# Altium schematic symbol library Centralize.SchLib: 1081 symbols (part 9 of 26)
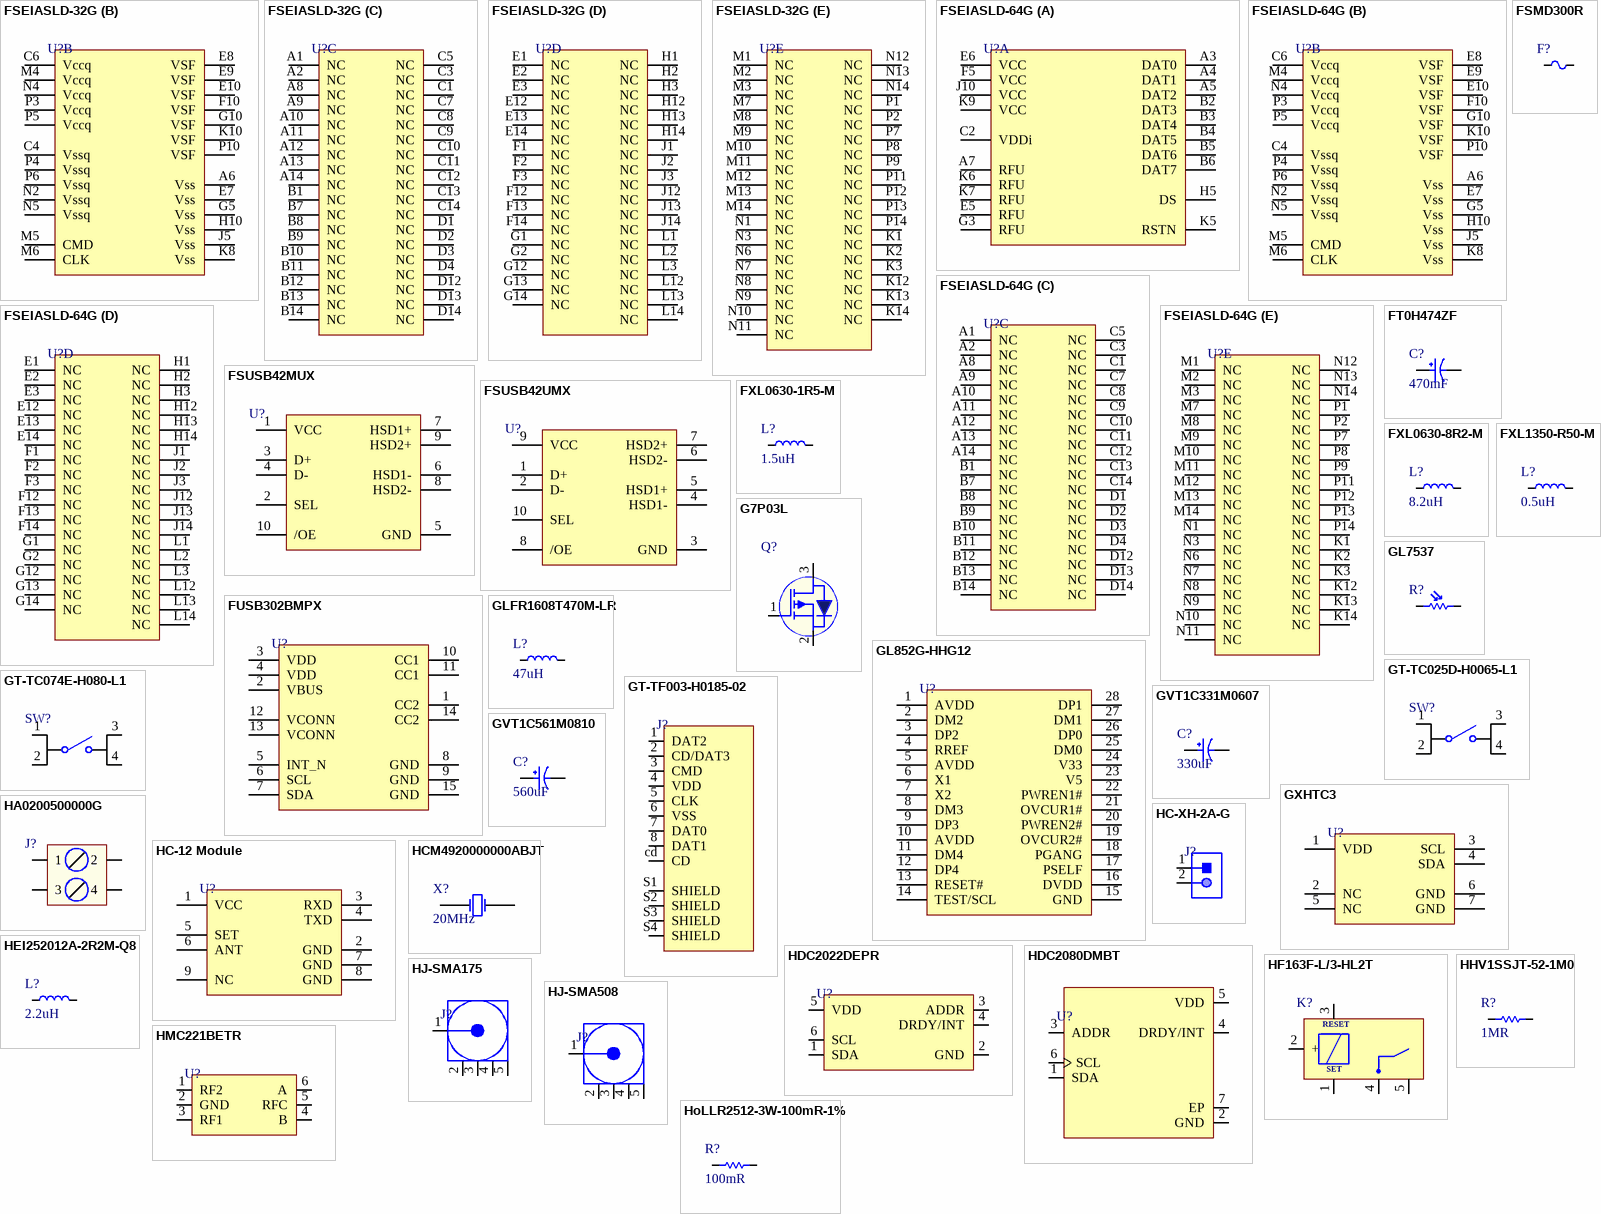
[diagram p55: symbols FSEIASLD-32G to HoLLR2512-3W-100mR-1%]

## HEI252012A-2R2M-Q8
designator L?, comment 2.2uH
2.5A 2.2uH ±20% 74mΩ SMD Power Inductors ROHS; Manufacturer: Chilisin Elec; Manufacturer Part Number: HEI252012A-2R2M-Q8; ComponentLink1Description: LCSC; ComponentLink1URL: https://lcsc.com/product-detail/Power-Inductors_Chilisin-Elec-HEI252012A-2R2M-Q8_C412888.html; Footprint: Custom
footprint HEI252012A-2R2M-Q8_ (IND SMD 2.2uH 2.5A)
pins: 1, 2

## HF163F-L/3-HL2T
designator K?
AgSnO2 3V 5 Normal Open:1A(SPST-Normal Open) Plugin,10x24mm Magnetic Latching Relays ROHS; Manufacturer: HF(Xiamen Hongfa Electroacoustic); Manufacturer Part Number: HF163F-L/3-HL2T; Item Type: Relay; Package: Plugin,10x24mm; LCSC Part Number: C140724; ComponentLink1Description: LCSC; ComponentLink1URL: https://www.lcsc.com/product-detail/Magnetic-Latching-Relays_HF-Xiamen-Hongfa-Electroacoustic-HF163F-L-3-HL2T_C140724.html
footprint HF163F-L/3-HL2T
pins: 1 SET, 2 +, 3 RESET, 4 COM, 5 NO

## HHV1SSJT-52-1M0
designator R?, comment 1MR
Metal Film Resistors 1MΩ 1W ±200ppm/℃ ±5% Plugin Through Hole Resistors ROHS; Manufacturer: YAGEO; Manufacturer Part Number: HHV1SSJT-52-1M0; Package: Plugin; LCSC Part Number: C432907; Item Type: Through Hole Resistor; ComponentLink1Description: LCSC; ComponentLink1URL: https://www.lcsc.com/product-detail/Through-Hole-Resistors_YAGEO-HHV1SSJT-52-1M0_C432907.html
footprint HHV1SSJT-52-1M0
pins: 1, 2

## HJ-SMA175
designator J?
1 Inner bore SMA Board Edge Bend 11mm 5.35mm Plugin RF Connectors / Coaxial Connectors ROHS; Manufacturer: HJ Tech; Manufacturer Part Number: HJ-SMA175; Item Type: SMA Connector; Package: Plugin; LCSC Part Number: C1509213; ComponentLink1Description: LCSC; ComponentLink1URL: https://www.lcsc.com/product-detail/RF-Connectors-Coaxial-Connectors_HJ-Tech-HJ-SMA175_C1509213.html
footprint HJ-SMA175
pins: 1 Signal "Signal Pin", 2 GND, 3 GND, 4 GND, 5 GND

## HJ-SMA508
designator J?
1 Inner bore SMA Board Edge Bend -55℃~+155℃ 50Ω Plugin RF Connectors / Coaxial Connectors ROHS; Manufacturer: HJ Tech; Manufacturer Part Number: HJ-SMA508; Footprint: Custom; ComponentLink1Description: LCSC; ComponentLink1URL: https://lcsc.com/product-detail/RF-Connectors-Coaxial-Connectors_HJ-Tech-HJ-SMA508_C1509209.html; LCSC Part Number: C1509209; Item Type: SMA
footprint HJ-SMA508_
pins: 1 Signal "Signal Pin", 2 GND, 3 GND, 4 GND, 5 GND

## HMC221BETR
designator U?
IC RF SWITCH SPDT 3GHZ SOT23-6; Manufacturer: Analog Devices; Manufacturer Part Number: HMC221BETR; Insertion Loss: 0.8dB; P1dB: 29dBm; IIP3: 54dBm; Impedance: 50R; Operating Frequency: DC to 3 GHz; Max Power Dissipation: 360mW; Number of Switches: 1; Operating Supply Voltage: 8V; Supplier 1: Digi-Key; RoHS: No; Category: RF Semiconductors and Devices; Stock 1: 2378; Pricing 1: 1=3.54, 10=3.183, 25=3.0092, 100=2.6081, 250=2.47436 (USD); Case/Package: SOT-23-6; Min Operating Temperature: -40°C; Max Operating Temperature: 85°C; Throw Configuration: SPDT; Series: -; Packaging: Tape and Reel; Test Frequency: 3GHz; Package Quantity: 500; Technology: GAAS; Clock Frequency: 3GHz; ComponentLink1URL: https://datasheet.ciiva.com/29636/hmc221b-29636048.pdf?src-supplier=Digi-Key; ComponentLink1Description: https://datasheet.ciiva.com/29636/hmc221b-29636048.pdf?src-supplier=Digi-Key; ComponentLink2URL: https://datasheet.ciiva.com/29636/qtr-2013-00285-29636046.pdf?src-supplier=Digi-Key; ComponentLink2Description: https://datasheet.ciiva.com/29636/qtr-2013-00285-29636046.pdf?src-supplier=Digi-Key; ComponentLink3URL: https://datasheet.ciiva.com/29636/qtr-2013-00285-29636047.pdf?src-supplier=Digi-Key; ComponentLink3Description: https://datasheet.ciiva.com/29636/qtr-2013-00285-29636047.pdf?src-supplier=Digi-Key; Supplier Part Number 1: 505-HMC221BETRCT-ND; Item Type: IC
footprint SOT-23-6
pins: 1 RF2 "0", 2 GND "0", 3 RF1 "0", 4 B "0", 5 RFC "0", 6 A "0"

## HoLLR2512-3W-100mR-1%
designator R?, comment 100mR
3W 100mΩ Surface Mount ±50ppm/℃ ±1% 2512 Current Sense Resistors/Shunt Resistors ROHS; Manufacturer: Milliohm; Manufacturer Part Number: HoLLR2512-3W-100mR-1%; Package: 2512; LCSC Part Number: C2994646; ComponentLink1Description: LCSC; ComponentLink1URL: https://www.lcsc.com/product-detail/Current-Sense-Resistors-Shunt-Resistors_Milliohm-HoLLR2512-3W-100mR-1_C2994646.html; Item Type: Resistor
footprint RES-2512
pins: 1, 2

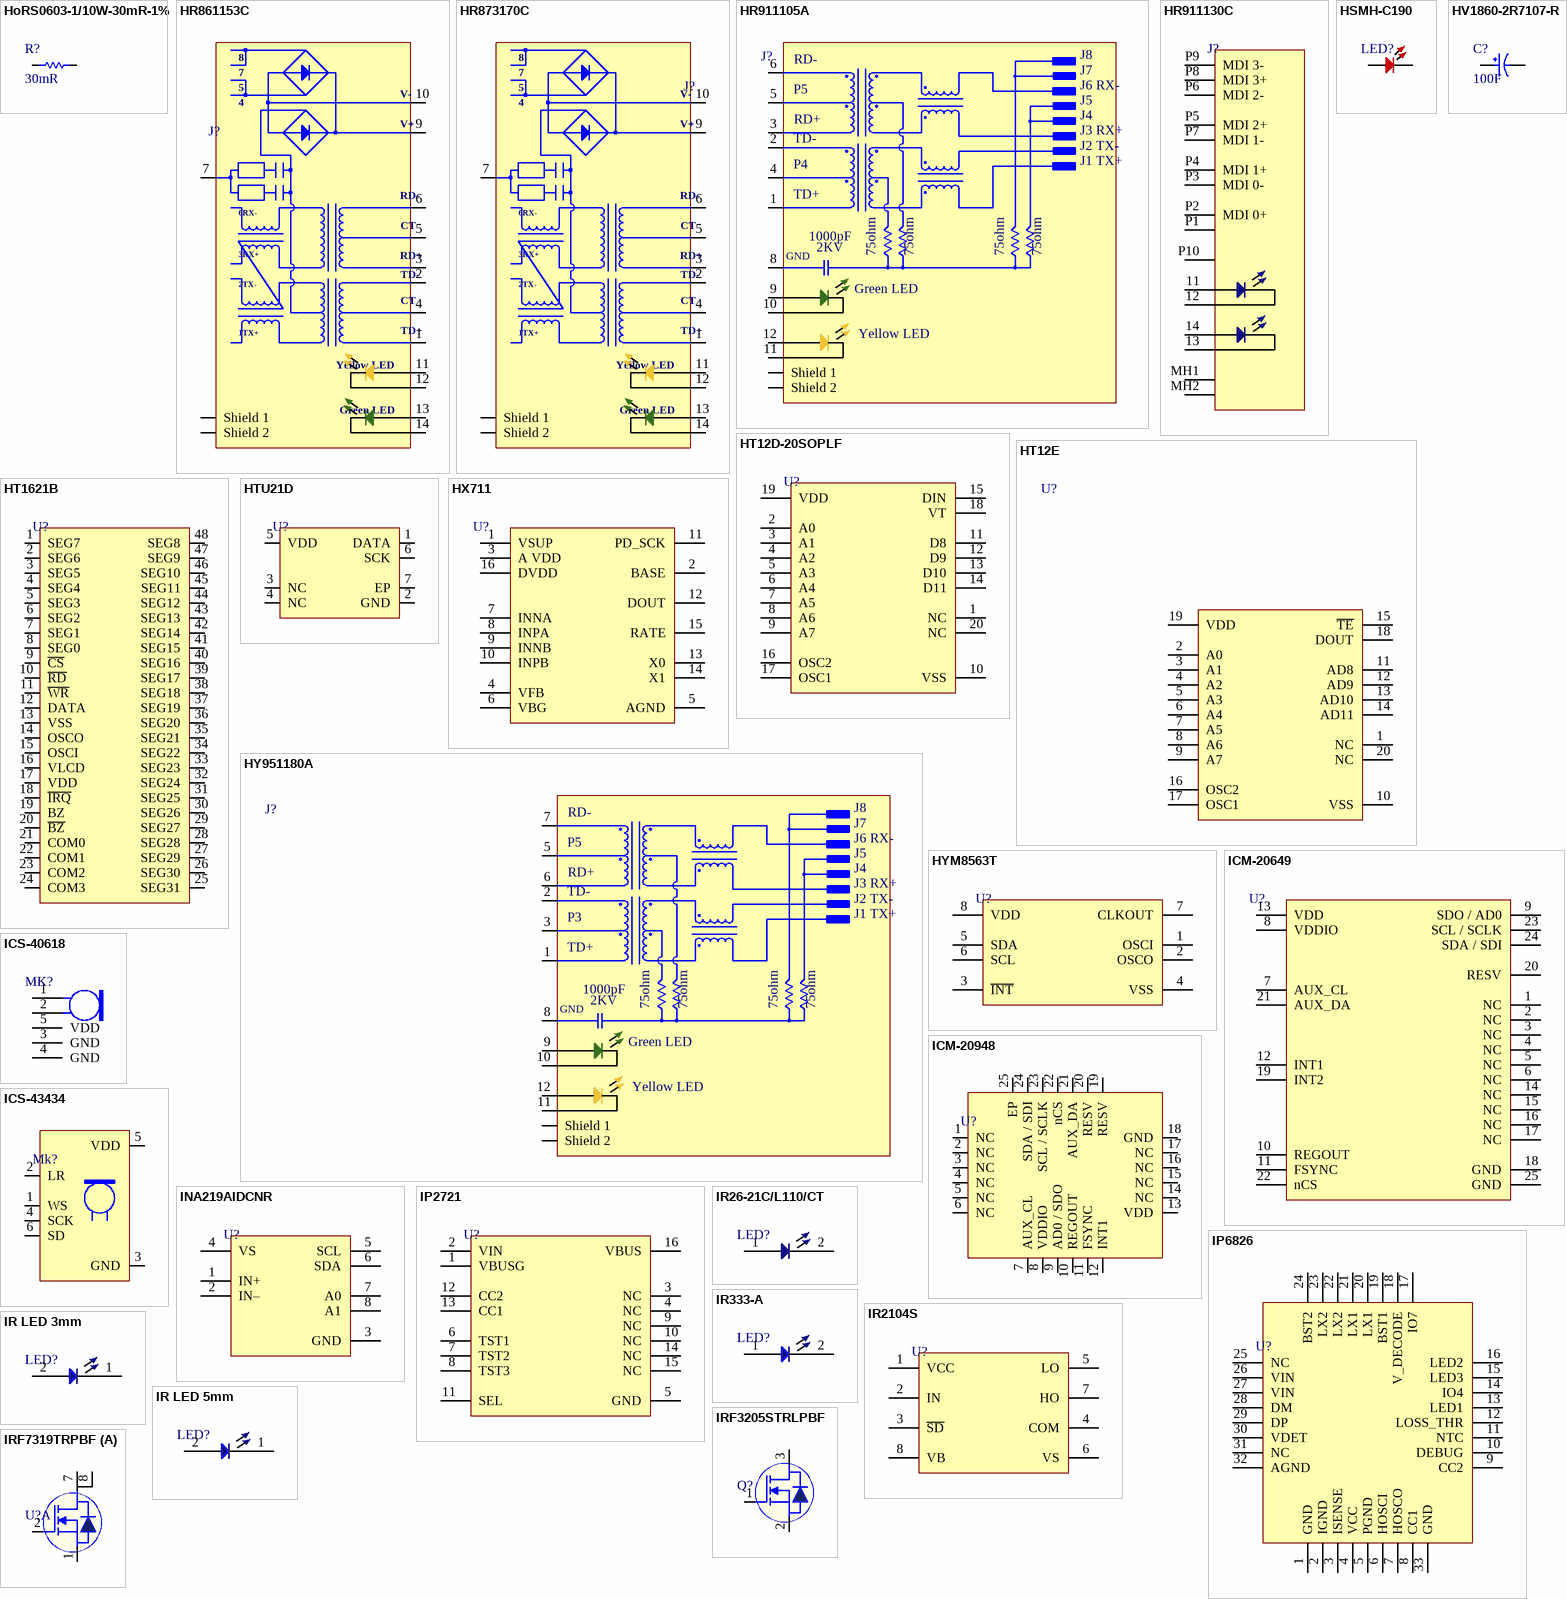
[diagram p10: symbols HoRS0603-1/10W-30mR-1% to IRF7319TRPBF]

## HoRS0603-1/10W-30mR-1%
designator R?, comment 30mR
100mW Ceramic resistor ±1% ±1200ppm/℃ 30mΩ 0603 Chip Resistor - Surface Mount ROHS; Manufacturer: Milliohm; Manufacturer Part Number: HoRS0603-1/10W-30mR-1%; Package: 0603; LCSC Part Number: C2912726; Item Type: Resistor; ComponentLink1Description: LCSC; ComponentLink1URL: https://www.lcsc.com/product-detail/Chip-Resistor-Surface-Mount_Milliohm-HoRS0603-1-10W-30mR-1_C2912726.html
footprint Res-0603
pins: 1, 2

## HR861153C
designator J?
Single Port RJ45 Connector with Integrated Magnetics and LED for 10/100Base-TX PoE application; Manufacturer: Hanrun; Manufacturer Part Number: HR861153C; Item Type: Ethernet Connector; Package: Custom; LCSC Part Number: *
footprint HR861153C
pins: 1 TD+, 2 TD-, 3 RD+, 4 CT, 5 CT, 6 RD-, 7 GND, 9 V+, 10 V-, 11 ANODE , 12 CATHODE, 13 ANODE , 14 CATHODE, Shield 1, Shield 2
text: 8; 6RX-; 3RX+; 2TX-; 1TX+; Yellow LED; Green LED

## HR873170C
designator J?
1x1 Port Tab-UP RJ45 Connector with Integrated Magnetics and LED for 10/100Base-T PoE application; Manufacturer: Hanrun; Manufacturer Part Number: HR873170C; Item Type: Ethernet Connector; Package: Custom; LCSC Part Number: *
footprint HR873170C
pins: 1 TD+, 2 TD-, 3 RD+, 4 CT, 5 CT, 6 RD-, 7 GND, 9 V+, 10 V-, 11 ANODE , 12 CATHODE, 13 ANODE , 14 CATHODE, Shield 1, Shield 2
text: 8; 6RX-; 3RX+; 2TX-; 1TX+; Yellow LED; Green LED

## HR911105A
designator J?
RJ45 RJReceptacle 1 WithLED Plugin Ethernet Connectors/Modular Connectors (RJ45 RJ11) ROHS; Manufacturer: HANRUN; Manufacturer Part Number: HR911105A; Item Type: RJ45 Connector; Package: Plugin; LCSC Part Number: C12074; ComponentLink1Description: LCSC; ComponentLink1URL: https://www.lcsc.com/product-detail/Ethernet-Connectors-Modular-Connectors-RJ45-RJ11_HANRUN-Zhongshan-HanRun-Elec-HR911105A_C12074.html
footprint HR911105A
pins: 1 TD+, 2 TD-, 3 RD+, 4 P4, 5 P5, 6 RD-, 8 GND (power), 9 ANODE , 10 CATHODE, 11 CATHODE, 12 ANODE , Shield 1, Shield 2
text: J8; J7; J6 RX-; J5; J4; J3 RX+; J2 TX-; J1 TX+; 1000pF; 2KV; 75ohm; Green LED; Yellow LED

## HR911130C
designator J?
RJ45 RJReceptacle 1 Internal oscillator included Shrouded WithLED Plugin Ethernet Connectors/Modular Connectors (RJ45 RJ11) ROHS; Manufacturer: HANRUN; Manufacturer Part Number: HR911130C; LCSC Part Number: C50933; Item Type: Ethernet Connector; ComponentLink1Description: LCSC; ComponentLink1URL: https://www.lcsc.com/product-detail/Ethernet-Connectors-Modular-Connectors-RJ45-RJ11_HANRUN-Zhongshan-HanRun-Elec-HR911130C_C50933.html
footprint HR911130C
pins: 11, 12, 13, 14, MH1, MH2, P1, P2 MDI 0+, P3 MDI 0-, P4 MDI 1+, P5 MDI 2+, P6 MDI 2-, P7 MDI 1-, P8 MDI 3+, P9 MDI 3-, P10

## HSMH-C190
designator LED?
LED RED DIFFUSED CHIP SMD; Manufacturer: Broadcom Avago; Manufacturer Part Number: HSMH-C190; Lens Color: White; Lens Style: Diffused,Colorless,Rectangular; Forward Voltage: 1.8V; Luminous Intensity: 17mcd; Wavelength: 639nm; Viewing Angle: 170°; Forward Current: 20mA; Power Dissipation: 52mW; Number of LEDs: 1; Reverse Voltage: 5V; Power Rating: 78mW; Supplier 1: Rs; RoHS: Yes; Category: LEDs; Stock 1: 1955; Pricing 1: 10=0.03600 (GBP); Mounting Technology: Surface Mount; Case/Package: 0603; Pins: 2; Color: Red; Case Code (Metric): 1608; Case Code (Imperial): 0603; Min Operating Temperature: -40°C; Max Operating Temperature: 85°C; Packaging: Tape and Reel; Dominant Wavelength: 639nm; Test Current: 20mA; Lens Transparency: Diffused; Max Power Dissipation: 52mW; Package Quantity: 1; Illumination Color: Red; Number of Elements: 1; Series: -; Length: 1.6mm; Width: 0.8mm; Height: 0.8mm; Depth: 0.8mm; Radiation Hardening: No; Reach SVHC Compliant: Yes; RoHS Compliant: Yes; Supplier Part Number 1: 7166570P; Item Type: LED
footprint LED-0603
pins: 1, 2

## HT12D-20SOPLF
designator U?
Remote Control Decoder, SMD, SOP20; Manufacturer: Holtek; Manufacturer Part Number: HT12D-20SOPLF; Nominal Supply Current: 200uA; Min Supply Voltage: 2.4V; Max Supply Voltage: 12V; Supplier 1: Newark; RoHS: Yes; Category: Integrated Circuits (ICs); Pricing 1: 1=2.11000, 10=1.80000, 100=1.44000, 500=1.33000, 1000=1.19000, 2500=0.96900, 5000=0.93700 (USD); Number of Pins: 20; Min Operating Temperature: -20°C; Max Operating Temperature: 75°C; REACH SVHC: No SVHC; ComponentLink1URL: https://datasheet.ciiva.com/1176/1525377-1176091.pdf?src-supplier=Newark; ComponentLink1Description: https://datasheet.ciiva.com/1176/1525377-1176091.pdf?src-supplier=Newark; ComponentLink2URL: https://datasheet.ciiva.com/1167/57850-1167133.pdf?src-supplier=Element14; ComponentLink2Description: https://datasheet.ciiva.com/1167/57850-1167133.pdf?src-supplier=Element14; Supplier Part Number 1: 53M7832
footprint SOP-20 (300 Mil)
pins: 1 NC, 2 A0, 3 A1, 4 A2, 5 A3, 6 A4, 7 A5, 8 A6, 9 A7, 10 VSS, 11 D8, 12 D9, 13 D10, 14 D11, 15 DIN, 16 OSC2, 17 OSC1, 18 VT, 19 VDD, 20 NC

## HT12E
designator U?
Remote Control Encoder, SMD, SOIC20; Manufacturer: Holtek; Manufacturer Part Number: HT12E-20SOP; Min Supply Voltage: 2.4V; Max Supply Voltage: 12V; Nominal Supply Current: 150uA; Supplier 1: RSComponents; RoHS: Yes; Category: Integrated Circuits (ICs); Stock 1: 1; Pricing 1: 38=1.61900, 76=1.41400, 190=1.33600, 380=1.30900, 760=1.28200 (USD); Case/Package: SOP; Number of Pins: 20; Min Operating Temperature: -20°C; Max Operating Temperature: 75°C; Length: 12.8mm; Width: 7.5mm; Height: 2.35mm; REACH SVHC: No SVHC; ComponentLink1URL: https://datasheet.ciiva.com/1167/57851-1167180.pdf?src-supplier=Element14; ComponentLink1Description: https://datasheet.ciiva.com/1167/57851-1167180.pdf?src-supplier=Element14; Supplier Part Number 1: 8850709
footprint SOP-20 (300 Mil)
pins: 1 NC, 2 A0, 3 A1, 4 A2, 5 A3, 6 A4, 7 A5, 8 A6, 9 A7, 10 VSS, 11 AD8, 12 AD9, 13 AD10, 14 AD11, 15 ~{TE}, 16 OSC2, 17 OSC1, 18 DOUT, 19 VDD, 20 NC

## HT1621B
designator U?
60uA 32x4 bit 2.4V~5.2V SSOP-48-300mil LCD Drivers ROHS; Manufacturer: Holtek Semicon; Manufacturer Part Number: HT1621B; Item Type: IC; Package: SSOP-48-300mil; LCSC Part Number: C7873; ComponentLink1Description: LCSC; ComponentLink1URL: https://www.lcsc.com/product-detail/LCD-Drivers_Holtek-Semicon-HT1621B_C7873.html
pins: 1 SEG7, 2 SEG6, 3 SEG5, 4 SEG4, 5 SEG3, 6 SEG2, 7 SEG1, 8 SEG0, 9 ~{CS}, 10 ~{RD}, 11 ~{WR}, 12 DATA, 13 VSS, 14 OSCO, 15 OSCI, 16 VLCD, 17 VDD, 18 ~{IRQ}, 19 BZ, 20 ~{BZ}, 21 COM0, 22 COM1, 23 COM2, 24 COM3, 25 SEG31, 26 SEG30, 27 SEG29, 28 SEG28, 29 SEG27, 30 SEG26, 31 SEG25, 32 SEG24, 33 SEG23, 34 SEG22, 35 SEG21, 36 SEG20, 37 SEG19, 38 SEG18, 39 SEG17, 40 SEG16, 41 SEG15, 42 SEG14, 43 SEG13, 44 SEG12, 45 SEG11, 46 SEG10, 47 SEG9, 48 SEG8

## HTU21D
designator U?
DFN-6-EP(3x3) Temperature and Humidity Sensor ROHS; Manufacturer: TE Connectivity; Manufacturer Part Number: HTU21D; Item Type: IC; Supplier: Mouser; Supplier Part Number: 824-HTU21D; RoHS: Yes; Category: Temperature and Humidity Sensors; Stock: 15840; Pricing: 1=8.23, 10=5.36, 50=5.36, 100=4.48, 400=3.75, 800=3.5, 1000=3.5, 2400=3.38, 4800=3.26, 10000=3.21, 24800=3.14 (USD); ComponentLink1URL: http://www.farnell.com/datasheets/2207166.pdf?src-supplier=Farnell; ComponentLink1Description: http://www.farnell.com/datasheets/2207166.pdf?src-supplier=Farnell; ComponentLink2URL: https://datasheet.octopart.com/HTU21D-TE-Connectivity-datasheet-22149496.pdf?src-supplier=Farnell; ComponentLink2Description: https://datasheet.octopart.com/HTU21D-TE-Connectivity-datasheet-22149496.pdf?src-supplier=Farnell; ComponentLink3URL: https://datasheet.octopart.com/HTU21D-TE-Connectivity-datasheet-65793082.pdf?src-supplier=Element14; ComponentLink3Description: https://datasheet.octopart.com/HTU21D-TE-Connectivity-datasheet-65793082.pdf?src-supplier=Element14; ComponentLink4URL: https://datasheet.octopart.com/HTU21D-TE-Connectivity-datasheet-41524056.pdf?src-supplier=Newark; ComponentLink4Description: https://datasheet.octopart.com/HTU21D-TE-Connectivity-datasheet-41524056.pdf?src-supplier=Newark; LCSC Part Number: C83479
footprint DFN-6-EP(3x3)
pins: 1 DATA, 2 GND, 3 NC, 4 NC, 5 VDD, 6 SCK, 7 EP

## HV1860-2R7107-R
designator C?, comment 100F
2.7V 100F 18x60mm HV supercapacitorsCylindrical cells HV1860-2R7107-R farah capacitance Low ESR high power density; Manufacturer: Eaton-Electronics Division; ComponentLink1Description: Aliexpress; ComponentLink1URL: https://www.aliexpress.us/item/1005005178120018.html?spm=a2g0o.productlist.main.13.22ec83d0nCwBMT&algo_pvid=e625171b-7a9a-4b0a-a350-9b000cf80403&algo_exp_id=e625171b-7a9a-4b0a-a350-9b000cf80403-6&pdp_npi=3%40dis%21PKR%21626.05%21626.05%21%21%21%21%21%40210218bf16836161604502874d0743%2112000031987184926%21sea%21PK%210&curPageLogUid=TmPmqoUSkMek; Manufacturer Part Number: HV1860-2R7107-R; Item Type: Capacitor
footprint HV1860-2R7107-R
pins: 1, 2

## HX711
designator U?
LOAD CELL AMP HX711; Manufacturer: Avia Semicon; Item Type: IC; Manufacturer Part Number: HX711; Package: SOP-16L; ComponentLink1Description: LCSC; ComponentLink1URL: https://www.lcsc.com/product-detail/Analog-To-Digital-Converters-ADCs_Avia-Semicon-Xiamen-HX711_C43656.html; LCSC Part Number: C43656
footprint SOP-16_150mil
pins: 1 VSUP, 2 BASE, 3 A VDD, 4 VFB, 5 AGND, 6 VBG, 7 INNA, 8 INPA, 9 INNB, 10 INPB, 11 PD_SCK, 12 DOUT, 13 X0, 14 X1, 15 RATE, 16 DVDD

## HY951180A
designator J?
Through Hole Ethernet Connectors/Modular Connectors (RJ45 RJ11) ROHS; Manufacturer: HANRUN; Manufacturer Part Number: HY951180A; Item Type: RJ45 Connector; Package: Custom; LCSC Part Number: C34677; ComponentLink1Description: LCSC; ComponentLink1URL: https://lcsc.com/product-detail/Ethernet-Connectors-Modular-Connectors-RJ45-RJ11_HANRUN-Zhongshan-HanRun-Elec-HY951180A_C34677.html
footprint HY951180A.
pins: 1 TD+, 2 TD-, 3 P3, 5 P5, 6 RD+, 7 RD-, 8 GND (power), 9 ANODE , 10 CATHODE, 11 CATHODE, 12 ANODE , Shield 1, Shield 2
text: J8; J7; J6 RX-; J5; J4; J3 RX+; J2 TX-; J1 TX+; 1000pF; 2KV; 75ohm; Green LED; Yellow LED

## HYM8563T
designator U?
SOP-8_150mil Real-time Clocks (RTC) ROHS; Manufacturer: Haoyu Microelectronics; Manufacturer Part Number: HYM8563T; Item Type: IC; LCSC Part Number: C107252; ComponentLink1Description: LCSC; ComponentLink1URL: https://www.lcsc.com/product-detail/Real-time-Clocks-RTC_Haoyu-Microelectronics-HYM8563T_C107252.html
footprint SOP-8
pins: 1 OSCI, 2 OSCO, 3 ~{INT}, 4 VSS, 5 SDA, 6 SCL, 7 CLKOUT, 8 VDD

## ICM-20649
designator U?
WIDE-FULL SCALE RANGE 6-AXIS MEM; Manufacturer: TDK InvenSense; Manufacturer Part Number: ICM-20649; Sensor Type: Accelerometer,Gyroscope,6 Axis,Temperature; Output Type: SPI,I2C; Supplier 1: Digi-Key; RoHS: Yes; Category: Inertial Measurement Units (IMUs); Stock 1: 4990; Pricing 1: 1=12.32000, 5=8.00000, 10=7.20000, 25=6.40000, 50=5.92000, 100=5.12000, 500=4.80000, 1000=4.48000 (USD); Mount: Surface Mount; Case/Package: QFN; Min Operating Temperature: -40°C; Max Operating Temperature: 85°C; Packaging: Tape and Reel; RoHS Compliant: Yes; Supplier Part Number 1: 1428-1142-1-ND
footprint 24-QFN (3x3)
pins: 1 NC, 2 NC, 3 NC, 4 NC, 5 NC, 6 NC, 7 AUX_CL, 8 VDDIO, 9 SDO / AD0, 10 REGOUT, 11 FSYNC, 12 INT1, 13 VDD, 14 NC, 15 NC, 16 NC, 17 NC, 18 GND, 19 INT2, 20 RESV, 21 AUX_DA, 22 nCS, 23 SCL / SCLK, 24 SDA / SDI, 25 GND

## ICM-20948
designator U?
IMU ACCEL/GYRO/COMPI2C/SPI 24QFN; Manufacturer: TDK; Manufacturer Part Number: ICM-20948; Sensor Type: Accelerometer,Gyroscope,Magnetometer; Output Type: SPI,I2C; Item Type: IC; Supplier: Mouser; Supplier Part Number: 410-ICM-20948; RoHS: Yes; Stock: 46595; Pricing: 1=8.85, 10=6.71, 50=6.71, 100=5.63, 1000=4.9, 10000=4.69 (USD); Mounting Technology: Surface Mount; Case/Package: QFN; Min Operating Temperature: -40°C; Max Operating Temperature: 85°C; Series: -; Packaging: Cut Tape; ComponentLink1URL: http://www.farnell.com/datasheets/2632662.pdf?src-supplier=Farnell; ComponentLink1Description: http://www.farnell.com/datasheets/2632662.pdf?src-supplier=Farnell; ComponentLink2URL: https://www.invensense.com/wp-content/uploads/2016/06/App-Note-eMD-20x48-User-Guide.pdf?src-supplier=Digi-Key; ComponentLink2Description: https://www.invensense.com/wp-content/uploads/2016/06/App-Note-eMD-20x48-User-Guide.pdf?src-supplier=Digi-Key; ComponentLink3URL: http://www.farnell.com/datasheets/2632662.pdf?src-supplier=Element14; ComponentLink3Description: http://www.farnell.com/datasheets/2632662.pdf?src-supplier=Element14; ComponentLink4URL: http://www.farnell.com/datasheets/2632662.pdf?src-supplier=Newark; ComponentLink4Description: http://www.farnell.com/datasheets/2632662.pdf?src-supplier=Newark; ComponentLink5URL: https://www.invensense.com/wp-content/uploads/2016/06/App-Note-eMD-20x48-User-Guide.pdf?src-supplier=Avnet; ComponentLink5Description: https://www.invensense.com/wp-content/uploads/2016/06/App-Note-eMD-20x48-User-Guide.pdf?src-supplier=Avnet; ComponentLink6URL: https://www.invensense.com/wp-content/uploads/2016/06/App-Note-eMD-20x48-User-Guide.pdf?src-supplier=Component+Distributors+Inc.; ComponentLink6Description: https://www.invensense.com/wp-content/uploads/2016/06/App-Note-eMD-20x48-User-Guide.pdf?src-supplier=Component+Distributors+Inc.
footprint 24-QFN (3x3)
pins: 1 NC, 2 NC, 3 NC, 4 NC, 5 NC, 6 NC, 7 AUX_CL, 8 VDDIO, 9 AD0 / SDO, 10 REGOUT, 11 FSYNC, 12 INT1, 13 VDD, 14 NC, 15 NC, 16 NC, 17 NC, 18 GND, 19 RESV, 20 RESV, 21 AUX_DA, 22 nCS, 23 SCL / SCLK, 24 SDA / SDI, 25 EP

## ICS-40618
designator MK?
MICROPHONE MEMS ANALOG OMNI; Manufacturer: TDK InvenSense; Manufacturer Part Number: ICS-40618; Shape: Rectangular; Direction: Omnidirectional; Operating Supply Current: 190uA; Supplier 1: RSComponents; RoHS: No; Category: Microphones; Stock 1: 500; Pricing 1: 200=1.80400, 1000=1.75400, 2500=1.71200, 5000=1.66700 (GBP); Output Type: Analog; Packaging: Tape and Reel; Termination: Solder; RoHS Compliant: No; ComponentLink1URL: https://www.mouser.com/ds/2/400/DS-000044-ICS-40618-v1.0-1115536.pdf?src-supplier=Mouser; ComponentLink1Description: https://www.mouser.com/ds/2/400/DS-000044-ICS-40618-v1.0-1115536.pdf?src-supplier=Mouser; ComponentLink2URL: https://www.invensense.com/wp-content/uploads/2016/02/DS-000044-ICS-40618-v1.0.pdf?src-supplier=Digi-Key; ComponentLink2Description: https://www.invensense.com/wp-content/uploads/2016/02/DS-000044-ICS-40618-v1.0.pdf?src-supplier=Digi-Key; Supplier Part Number 1: 2182224P; LCSC Part Number: C3171730; Item Type: Microphone
footprint ICS-40618_ (MICROPHONE MEMS ANALOG OMNI)
pins: 1 OUTPUT+, 2 OUTPUT-, 3 GND, 4 GND, 5 VDD

## ICS-43434
designator Mk?
Mic Omni-Directional -26dB 3.63V Rectangular Solder Pad T/R; Manufacturer: TDK InvenSense; Manufacturer Part Number: ICS-43434; Direction: Omnidirectional; Operating Supply Current: 550uA; Item Type: MICROPHONE; Supplier: Rs; Supplier Part Number: 2182235; RoHS: No; Category: Microphones; Stock: 355; Pricing: 5=2.686, 100=2.142, 1000=2.086, 2500=2.032, 5000=1.984 (GBP); Shape: Rectangular; Packaging: Cut Tape; Termination: Solder; Series: ICS-43434; RoHS Compliant: No; ComponentLink1URL: http://www.farnell.com/datasheets/2632666.pdf?src-supplier=Farnell; ComponentLink1Description: http://www.farnell.com/datasheets/2632666.pdf?src-supplier=Farnell; ComponentLink2URL: https://www.invensense.com/wp-content/uploads/2016/02/DS-000069-ICS-43434-v1.2.pdf?src-supplier=Digi-Key; ComponentLink2Description: https://www.invensense.com/wp-content/uploads/2016/02/DS-000069-ICS-43434-v1.2.pdf?src-supplier=Digi-Key; ComponentLink3URL: https://www.invensense.com/wp-content/uploads/2016/02/PB-000018-ICS-43434-v1.1.pdf?src-supplier=Digi-Key; ComponentLink3Description: https://www.invensense.com/wp-content/uploads/2016/02/PB-000018-ICS-43434-v1.1.pdf?src-supplier=Digi-Key; ComponentLink4URL: http://www.farnell.com/datasheets/2632666.pdf?src-supplier=Element14; ComponentLink4Description: http://www.farnell.com/datasheets/2632666.pdf?src-supplier=Element14; ComponentLink5URL: http://www.farnell.com/datasheets/2632666.pdf?src-supplier=Newark; ComponentLink5Description: http://www.farnell.com/datasheets/2632666.pdf?src-supplier=Newark
footprint ICS-43434
pins: 1 WS, 2 LR, 3 GND, 4 SCK, 5 VDD, 6 SD

## INA219AIDCNR
designator U?
IC CURRENT MONITOR 1% SOT23-8; Manufacturer: Texas Instruments; Manufacturer Part Number: INA219AIDCNR; Nominal Supply Current: 700uA; Common Mode Rejection Ratio: 100dB; Max Supply Voltage: 5.5V; Min Supply Voltage: 3V; Output Current: 10mA; Bandwidth: 3.4MHz; Min Input Voltage: 0V; Operating Supply Current: 1mA; Number of Amplifiers: 1; Input Offset Voltage (Vos): 100uV; Max Supply Current: 5mA; Output Type: Digital; Supplier 1: Mouser; RoHS: Yes; Category: Amplifiers - Op Amps, Buffer, Instrumentation; Stock 1: 22974; Pricing 1: 1=2.62000, 10=2.36000, 50=2.23000, 100=1.90000, 1000=1.29000, 10000=1.21000 (USD); Case/Package: SOT-23-8; Pins: 8; Contact Plating: Gold; Weight: 0.001411oz; Min Operating Temperature: -40°C; Max Operating Temperature: 125°C; Packaging: Tape and Reel; Package Quantity: 3000; Accuracy: 1%; Series: Zero-Drift; Supply Current: 700uA; Quiescent Current: 700uA; Output Current per Channel: 10mA; Features: I²C; Length: 3mm; Width: 1.75mm; Height: 1.3mm; Radiation Hardening: No; RoHS Compliant: Yes; Lead Free: Lead Free; Reach SVHC Compliant: Yes; ComponentLink1URL: https://datasheet.ciiva.com/15132/getdatasheetpartid-327029-15132621.pdf?src-supplier=Verical; ComponentLink1Description: https://datasheet.ciiva.com/15132/getdatasheetpartid-327029-15132621.pdf?src-supplier=Verical; ComponentLink2URL: https://datasheet.ciiva.com/1492/ina219-1492467.pdf?src-supplier=Farnell; ComponentLink2Description: https://datasheet.ciiva.com/1492/ina219-1492467.pdf?src-supplier=Farnell; ComponentLink3URL: https://datasheet.ciiva.com/1484/1725057-1484939.pdf?src-supplier=Element14; ComponentLink3Description: https://datasheet.ciiva.com/1484/1725057-1484939.pdf?src-supplier=Element14; ComponentLink4URL: https://datasheet.ciiva.com/22658/1725057-22658890.pdf?src-supplier=Element14; ComponentLink4Description: https://datasheet.ciiva.com/22658/1725057-22658890.pdf?src-supplier=Element14; ComponentLink5URL: https://datasheet.ciiva.com/1939/ina219-1939574.pdf?src-supplier=Digi-Key; ComponentLink5Description: https://datasheet.ciiva.com/1939/ina219-1939574.pdf?src-supplier=Digi-Key; ComponentLink6URL: https://datasheet.ciiva.com/1939/ina219-1939573.pdf?src-supplier=Digi-Key; ComponentLink6Description: https://datasheet.ciiva.com/1939/ina219-1939573.pdf?src-supplier=Digi-Key; ComponentLink7URL: https://datasheet.ciiva.com/1939/ina219-1939575.pdf?src-supplier=Digi-Key; ComponentLink7Description: https://datasheet.ciiva.com/1939/ina219-1939575.pdf?src-supplier=Digi-Key; ComponentLink8URL: https://datasheet.ciiva.com/2965/ina219-2965724.pdf?src-supplier=Avnet; ComponentLink8Description: https://datasheet.ciiva.com/2965/ina219-2965724.pdf?src-supplier=Avnet; Supplier Part Number 1: 595-INA219AIDCNR; LCSC Part Number: C87469; Item Type: IC
footprint SOT-23-8
pins: 1 IN+, 2 IN–, 3 GND, 4 VS, 5 SCL, 6 SDA, 7 A0, 8 A1

## IP2721
designator U?
TSSOP-16 Interface - Specialized ROHS; Manufacturer: INJOINIC; Manufacturer Part Number: IP2721; Footprint: TSSOP-16; ComponentLink1Description: LCSC; ComponentLink1URL: https://www.lcsc.com/product-detail/Interface-Specialized_INJOINIC-IP2721_C603176.html; LCSC Part Number: C603176
footprint TSSOP_16
pins: 1 VBUSG, 2 VIN, 3 NC, 4 NC, 5 GND, 6 TST1, 7 TST2, 8 TST3, 9 NC, 10 NC, 11 SEL, 12 CC2, 13 CC1, 14 NC, 15 NC, 16 VBUS

## IP6826
designator U?
QFN-32-EP(5x5) Wireless Charge-Discharge ICs ROHS; Manufacturer: INJOINIC; Manufacturer Part Number: IP6826; Item Type: IC; Package: QFN-32-EP(5x5); LCSC Part Number: C2921390; ComponentLink1Description: LCSC; ComponentLink1URL: https://www.lcsc.com/product-detail/Wireless-Charge-Discharge-ICs_INJOINIC-IP6826_C2921390.html
footprint 32-QFN (32pins, 5x5mm body, 0.5mm pitch QFN package)
pins: 1 GND, 2 IGND, 3 ISENSE, 4 VCC, 5 PGND, 6 HOSCI, 7 HOSCO, 8 CC1, 9 CC2, 10 DEBUG, 11 NTC, 12 LOSS_THR, 13 LED1, 14 IO4, 15 LED3, 16 LED2, 17 IO7, 18 V_DECODE, 19 BST1, 20 LX1, 21 LX1, 22 LX2, 23 LX2, 24 BST2, 25 NC, 26 VIN, 27 VIN, 28 DM, 29 DP, 30 VDET, 31 NC, 32 AGND, 33 GND

## IR26-21C/L110/CT
designator LED?
4.25mW/sr @ 20mA 940nm 1.2V 65mA 1206 Infrared (IR) LEDs ROHS; Manufacturer: Everlight Elec; Manufacturer Part Number: IR26-21C/L110/CT; ComponentLink1Description: LCSC; ComponentLink1URL: https://www.lcsc.com/product-detail/Infrared-IR-LEDs_Everlight-Elec-IR26-21C-L110-CT_C131280.html; Package: 1206
footprint LED_1206
pins: 1, 2

## IR333-A
designator LED?
EMITTER IR 940NM 100MA RADIAL; Manufacturer: Everlight; Manufacturer Part Number: IR333-A; Forward Current: 50mA; Forward Voltage: 1.2V; Viewing Angle: 20°; Lens Style: Diffused,Colored,Circular; Number of LEDs: 1; Test Current: 20mA; Power Dissipation: 100mW; Reverse Voltage: 5V; Item Type: Infrared LED; Supplier 1: Digi-Key; RoHS: Yes; Category: LEDs; Stock 1: 73854; Pricing 1: 1=0.54000, 10=0.33000, 100=0.18950, 1000=0.14832, 2000=0.13596, 5000=0.12360, 10000=0.11536, 25000=0.11124 (USD); Mount: Through Hole; Case/Package: Radial; Number of Pins: 2; Min Operating Temperature: -40°C; Max Operating Temperature: 85°C; Packaging: Bulk; Wavelength: 940nm; Package Quantity: 500; Number of Elements: 1; Orientation: Top View; Series: -; Max Power Dissipation: 100mW; Length: 5.9mm; Depth: 5.9mm; RoHS Compliant: Yes; Lead Free: Lead Free; ComponentLink1URL: https://datasheet.ciiva.com/2107/201407061516067600-2107736.pdf?src-supplier=Digi-Key; ComponentLink1Description: https://datasheet.ciiva.com/2107/201407061516067600-2107736.pdf?src-supplier=Digi-Key; ComponentLink2URL: https://datasheet.ciiva.com/48438/ir333-a-eng-tds-48438869.pdf?src-supplier=Distrelec; ComponentLink2Description: https://datasheet.ciiva.com/48438/ir333-a-eng-tds-48438869.pdf?src-supplier=Distrelec; Supplier Part Number 1: 1080-1080-ND; LCSC Part Number: C95407
footprint IR333_A
footprint IR333-A Cut
pins: 1, 2

## IR2104S
designator U?
IC DRIVER HIGH/LOW SIDE 8SOIC; Manufacturer: Infineon Technologies; Manufacturer Part Number: IR2104STRPBF; Package: SOIC-8; LCSC Part Number: C537543; Item Type: IC; ComponentLink1Description: LCSC; ComponentLink1URL: https://www.lcsc.com/product-detail/Gate-Drive-ICs_Infineon-Technologies-IR2104SPBF_C537543.html
footprint SOIC-8
pins: 1 VCC, 2 IN, 3 ~{SD}, 4 COM, 5 LO, 6 VS, 7 HO, 8 VB

## IR LED 3mm
designator LED?
IR Led 3mm Through; ComponentLink1Description: Aliexpress; ComponentLink1URL: https://nl.aliexpress.com/item/32950109432.html?spm=a2g0o.productlist.0.0.2d9749ecxdTGvK&algo_pvid=f3c88197-d0dd-4360-badc-ef5a9d1d435b&algo_exp_id=f3c88197-d0dd-4360-badc-ef5a9d1d435b-1&pdp_ext_f=%7B%22sku_id%22%3A%2266309321327%22%7D
footprint TH LED 3mm_
pins: 1, 2

## IR LED 5mm
designator LED?
IR Led 5mm Through; ComponentLink1Description: Aliexpress; ComponentLink1URL: https://nl.aliexpress.com/item/32950109432.html?spm=a2g0o.productlist.0.0.2d9749ecxdTGvK&algo_pvid=f3c88197-d0dd-4360-badc-ef5a9d1d435b&algo_exp_id=f3c88197-d0dd-4360-badc-ef5a9d1d435b-1&pdp_ext_f=%7B%22sku_id%22%3A%2266309321327%22%7D
footprint TH LED 5mm_
pins: 1, 2

## IRF3205STRLPBF
designator Q?
MOSFET N-CH 55V 110A D2PAK; Manufacturer: Infineon Technologies; Manufacturer Part Number: IRF3205STRLPBF; Package: D2PAK; ComponentLink1URL: https://www.lcsc.com/product-detail/MOSFETs_Infineon-Technologies-IRF3205STRLPBF_C2613.html; ComponentLink1Description: LCSC; LCSC Part Number: C2613; Item Type: Mosfet
footprint D2Pak.
pins: 1 G, 2 S, 3 D

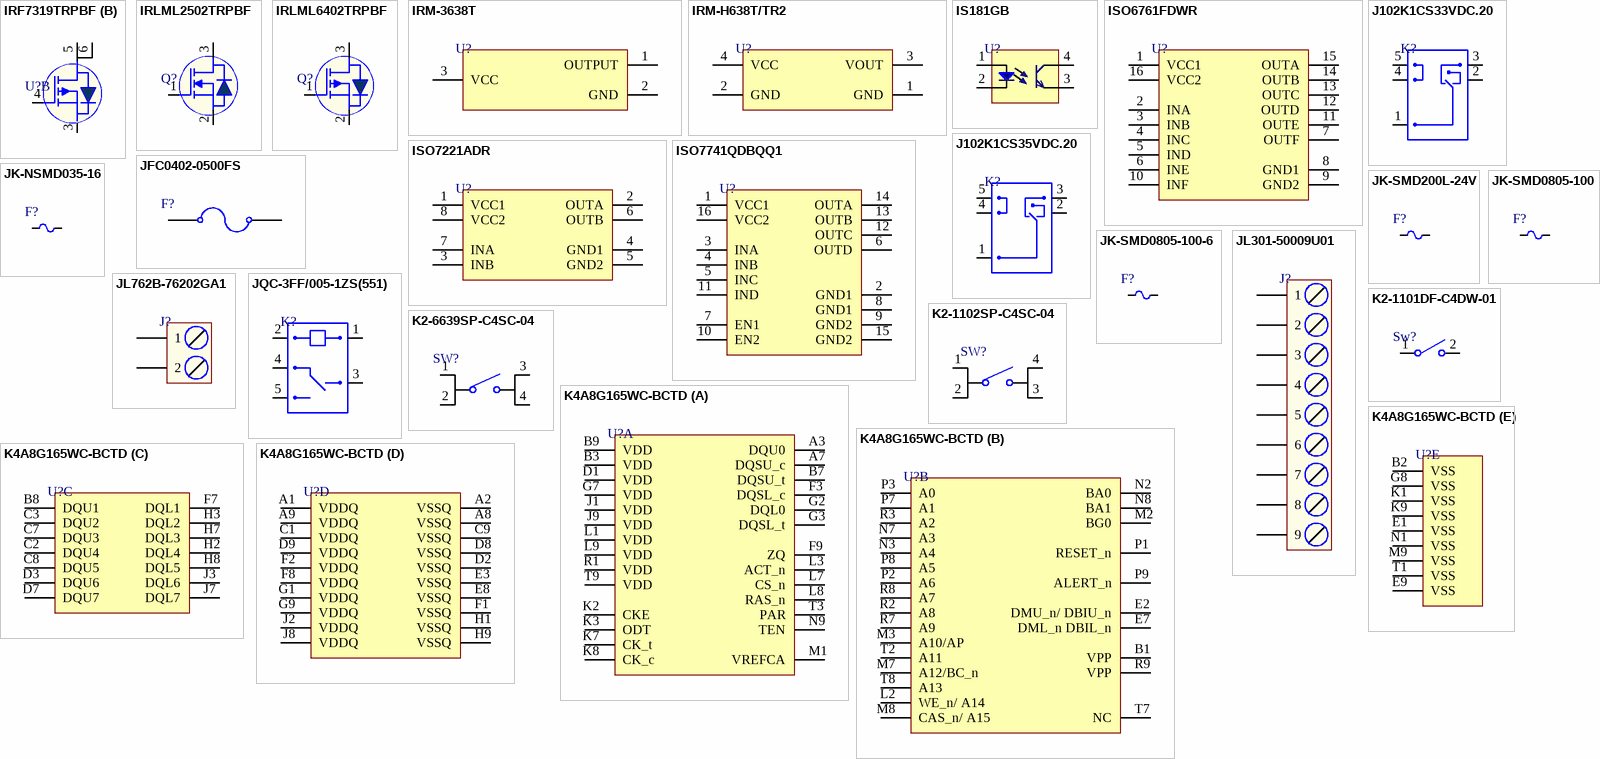
[diagram p11: symbols IRF7319TRPBF to K4A8G165WC-BCTD]

## IRF7319TRPBF
designator U?
MOSFET N/P-CH 30V 8SOIC; Manufacturer: International Rectifier; Manufacturer Part Number: IRF7319TRPBF; Continuous Drain Current (ID): 6.5A; Gate to Source Voltage (Vgs): 20V; Rise Time: 13ns; Nominal Vgs: 1V; Rds On Max: 29mR; Input Capacitance: 650pF; Number of Elements: 2; Max Power Dissipation: 2W; Drain to Source Resistance: 46mR; Turn-Off Delay Time: 34ns; FET Type: N and P-Channel; Supplier 1: Digi-Key; Stock 1: 0; Pricing 1: 1=1.08, 10=0.968, 25=0.9184, 100=0.7544, 500=0.62316, 1000=0.4991 (USD); Mount: Surface Mount; Case/Package: SOIC; Number of Pins: 8; Min Operating Temperature: -55°C; Max Operating Temperature: 150°C; Packaging: Tape and Reel; Drain to Source Breakdown Voltage: 30V; Current Rating: 6.5A; Package Quantity: 4000; Drain to Source Voltage (Vdss): 30V; Power Dissipation: 2W; Threshold Voltage: 1V; On-State Resistance: 29mR; Series: HEXFET®; Drain-source On Resistance-Max: 29mR; Length: 5mm; Width: 4mm; Height: 1.5mm; Radiation Hardening: No; Lead Free: Lead Free; RoHS Compliant: Yes; REACH SVHC: No SVHC; ComponentLink1URL: http://www.farnell.com/datasheets/137692.pdf?src-supplier=Newark; ComponentLink1Description: http://www.farnell.com/datasheets/137692.pdf?src-supplier=Newark; ComponentLink2URL: https://www.infineon.com/dgdl/irf7319pbf.pdf?fileId=5546d462533600a4015355f5c82f1b41&src-supplier=Digi-Key; ComponentLink2Description: https://www.infineon.com/dgdl/irf7319pbf.pdf?fileId=5546d462533600a4015355f5c82f1b41&src-supplier=Digi-Key; ComponentLink3URL: http://www.irf.com/product-info/datasheets/data/irf7319pbf.pdf?src-supplier=Future+Electronics; ComponentLink3Description: http://www.irf.com/product-info/datasheets/data/irf7319pbf.pdf?src-supplier=Future+Electronics; ComponentLink4URL: http://datasheet.iiic.cc/international_rectifier/IRF7319TRPBF.pdf?src-supplier=IIIC; ComponentLink4Description: http://datasheet.iiic.cc/international_rectifier/IRF7319TRPBF.pdf?src-supplier=IIIC; Supplier Part Number 1: IRF7319PBFCT-ND; LCSC Part Number: C5123893
footprint SOP-8
part A pins: 1 S1, 2 G1, 7 D1, 8 D1
part B pins: 3 S2, 4 G2, 5 D2, 6 D2

## IRLML2502TRPBF
designator Q?
MOSFET N-CH 20V 4.2A SOT23; Manufacturer: Infineon Technologies; Manufacturer Part Number: IRLML2502TRPBF; Package: SOT-23; ComponentLink2URL: https://www.lcsc.com/product-detail/MOSFETs_Infineon-Technologies-IRLML2502TRPBF_C2589.html; ComponentLink2Description: LCSC; LCSC Part Number: C2589; Item Type: Mosfet
footprint SOT-23 (TRANS NPN 40V 0.6A SOT23)
pins: 1 G, 2 S, 3 D

## IRLML6402TRPBF
designator Q?
MOSFET P-CH 20V 3.7A SOT23; Manufacturer: International Rectifier; Manufacturer Part Number: IRLML6402TRPBF; Package: SOT-23; LCSC Part Number: C5182043; Item Type: Mosfet; ComponentLink11Description: LCSC; ComponentLink11URL: https://www.lcsc.com/product-detail/MOSFETs_TECH-PUBLIC-IRLML6402TRPBF_C5182043.html
footprint SOT-23 (TRANS NPN 40V 0.6A SOT23)
pins: 1 G, 2 S, 3 D

## IRM-3638T
designator U?
SENSOR REMOTE REC 38.0KHZ 14M; Manufacturer: Everlight; Manufacturer Part Number: IRM-3638T; Operating Supply Current: 1mA; Min Output Voltage: 2.7V; Operating Supply Voltage: 5.5V; Item Type: IC; Supplier 1: Future Electronics; RoHS: Yes; Category: Optical Sensors; Pricing 1: 250=0.20500, 1500=0.19700, 5000=0.19000, 10000=0.18600, 20000=0.18000 (USD); Mount: Through Hole; Case/Package: Module; Number of Pins: 3; Min Operating Temperature: -25°C; Max Operating Temperature: 80°C; Package Quantity: 250; Series: -; Sensing Distance: 14m; Orientation: Side View; RoHS Compliant: Yes; ComponentLink1URL: https://datasheet.ciiva.com/12418/irm-3636t-27149-12418050.pdf?src-supplier=Mouser; ComponentLink1Description: https://datasheet.ciiva.com/12418/irm-3636t-27149-12418050.pdf?src-supplier=Mouser; ComponentLink2URL: https://datasheet.ciiva.com/2821/irm-36xxt-series-2821351.pdf?src-supplier=Digi-Key; ComponentLink2Description: https://datasheet.ciiva.com/2821/irm-36xxt-series-2821351.pdf?src-supplier=Digi-Key; LCSC Part Number: C16216; Supplier Part Number 1: 2052908
footprint SIP-3P-2.54mm
pins: 1 OUTPUT, 2 GND, 3 VCC

## IRM-H638T/TR2
designator U?
IRM-H6 Series External Dimensions 5 x 7 x 4 mm SMT Infrared Receiver; Manufacturer: Everlight; Manufacturer Part Number: IRM-H638T/TR2; Sensing Distance: 8m; Operating Supply Current: 1.2mA; Operating Supply Voltage: 5.5V; Item Type: IC; Supplier 1: Future Electronics; RoHS: Yes; Category: Optical Sensors; Pricing 1: 1000=0.53500, 2000=0.52000, 3000=0.51500, 4000=0.51000, 5000=0.49500 (USD); Mount: Surface Mount; Number of Pins: 4; Min Operating Temperature: -25°C; Max Operating Temperature: 85°C; Packaging: Tape and Reel; Package Quantity: 2000; Orientation: Top View; Lead Free: Lead Free; RoHS Compliant: Yes; ComponentLink1URL: https://datasheet.ciiva.com/12418/irm-h638t-tr2-41100-12418542.pdf?src-supplier=Mouser; ComponentLink1Description: https://datasheet.ciiva.com/12418/irm-h638t-tr2-41100-12418542.pdf?src-supplier=Mouser; Supplier Part Number 1: 5043152; LCSC Part Number: C91447
footprint SMD-4,4x5mm
pins: 1 GND, 2 GND, 3 VOUT, 4 VCC

## IS181GB
designator U?
Optoisolator Transistor Output 3750Vrms 1 Channel; Manufacturer: Isocom; Manufacturer Part Number: IS181GB; Forward Current: 50mA; Reverse Breakdown Voltage: 6V; Isolation Voltage: 3.75kV; Rise Time: 18000ns; Power Dissipation: 170mW; Number of Elements: 1; Collector Emitter Saturation Voltage: 200mV; Forward Voltage: 1.4V; Collector Emitter Voltage (VCEO): 80V; Current Transfer Ratio: 600%; Item Type: Optocoupler; Supplier 1: Arrow Electronics; RoHS: Yes; Category: Optocouplers; Stock 1: 2922; Pricing 1: 1=0.55080, 10=0.34190, 25=0.33860, 50=0.33530, 100=0.19360, 250=0.19160, 500=0.18960, 1000=0.14750 (USD); Mount: Surface Mount; Case/Package: SMD/SMT; Number of Pins: 4; Min Operating Temperature: -55°C; Max Operating Temperature: 100°C; Fall Time: 18000ns; Radiation Hardening: No; Lead Free: Lead Free; RoHS Compliant: Yes; ComponentLink1URL: https://datasheet.ciiva.com/26895/getdatasheetpartid-624485-26895717.pdf?src-supplier=Verical; ComponentLink1Description: https://datasheet.ciiva.com/26895/getdatasheetpartid-624485-26895717.pdf?src-supplier=Verical; ComponentLink2URL: https://datasheet.ciiva.com/29301/183289-da-01-en-optokoppler-is181-gb-29301106.pdf?src-supplier=Conrad; ComponentLink2Description: https://datasheet.ciiva.com/29301/183289-da-01-en-optokoppler-is181-gb-29301106.pdf?src-supplier=Conrad; Supplier Part Number 1: IS181GB; LCSC Part Number: C84196
footprint SOP-4_2.54
pins: 1 An, 2 Ca, 3 E, 4 C

## ISO6761FDWR
designator U?
GENERAL PURPOSE, 50-MBPS, SIX-CH; Manufacturer: Texas Instruments; Manufacturer Part Number: ISO6761FDWR; Supplier 1: Digi-Key; RoHS: No; Stock 1: 818; Pricing 1: 1=3.93000, 10=3.53200, 25=3.33920, 100=2.89380, 250=2.74540, 500=2.46344, 1000=2.24000 (USD); Supplier Part Number 1: 296-ISO6761FDWRCT-ND
footprint 16-SOIC
pins: 1 VCC1, 2 INA, 3 INB, 4 INC, 5 IND, 6 INE, 7 OUTF, 8 GND1, 9 GND2, 10 INF, 11 OUTE, 12 OUTD, 13 OUTC, 14 OUTB, 15 OUTA, 16 VCC2

## ISO7221ADR
designator U?
DGTL ISO 2500VRMS 2CH GP 8SOIC; Manufacturer: Texas Instruments; Manufacturer Part Number: ISO7221ADR; Number of Channels: 2; Data Rate: 1Mbps; Propagation Delay: 475ns; Min Supply Voltage: 3V; Max Supply Voltage: 5.5V; Nominal Supply Current: 10mA; Channel Type: Unidirectional; Isolated Power: No; Pulse Width Distortion (PWD): 14ns; Operating Supply Voltage: 5V; Supplier 1: Mouser; RoHS: Yes; Category: Interface ICs; Pricing 1: 1=3.32000, 10=2.99000, 25=2.83000, 50=2.83000, 100=2.45000, 250=2.32000, 500=2.09000, 1000=1.82000, 10000=1.82000 (USD); Case/Package: SOIC; Number of Pins: 8; Contact Plating: Gold; Weight: 0.019048oz; Min Operating Temperature: -40°C; Max Operating Temperature: 125°C; Package Quantity: 1; Packaging: Tape and Reel; Turn-On Delay Time: 475ns; Type: General Purpose; Series: -; Polarity: Unidirectional; Supply Current: 10mA; Radiation Hardening: No; Lead Free: Lead Free; RoHS Compliant: Yes; REACH SVHC: No SVHC; ComponentLink1URL: https://datasheet.ciiva.com/1496/1763999-1496560.pdf?src-supplier=Element14; ComponentLink1Description: https://datasheet.ciiva.com/1496/1763999-1496560.pdf?src-supplier=Element14; ComponentLink2URL: https://datasheet.ciiva.com/2081/iso7220a-2081968.pdf?src-supplier=Digi-Key; ComponentLink2Description: https://datasheet.ciiva.com/2081/iso7220a-2081968.pdf?src-supplier=Digi-Key; ComponentLink3URL: https://datasheet.ciiva.com/2081/iso7220a-2081969.pdf?src-supplier=Digi-Key; ComponentLink3Description: https://datasheet.ciiva.com/2081/iso7220a-2081969.pdf?src-supplier=Digi-Key; ComponentLink4URL: https://datasheet.ciiva.com/2081/iso7220a-2081970.pdf?src-supplier=Digi-Key; ComponentLink4Description: https://datasheet.ciiva.com/2081/iso7220a-2081970.pdf?src-supplier=Digi-Key; ComponentLink5URL: https://datasheet.ciiva.com/14196/iso7221m-14196783.pdf?src-supplier=Avnet; ComponentLink5Description: https://datasheet.ciiva.com/14196/iso7221m-14196783.pdf?src-supplier=Avnet; ComponentLink6URL: https://datasheet.ciiva.com/15224/getdatasheetpartid-298868-15224022.pdf?src-supplier=Verical; ComponentLink6Description: https://datasheet.ciiva.com/15224/getdatasheetpartid-298868-15224022.pdf?src-supplier=Verical; Supplier Part Number 1: 595-ISO7221ADR; LCSC Part Number: C28037
footprint SOIC-8
pins: 1 VCC1, 2 OUTA, 3 INB, 4 GND1, 5 GND2, 6 OUTB, 7 INA, 8 VCC2

## ISO7741QDBQQ1
designator U?
DGTL ISO 3000VRMS 4CH 16SSOP; Manufacturer: Texas Instruments; Manufacturer Part Number: ISO7741QDBQQ1; Number of Channels: 4; Isolated Power: No; Channel Type: Unidirectional; Data Rate: 100Mbps; Propagation Delay: 16ns; Pulse Width Distortion (PWD): 4.9ns; Supplier 1: Digi-Key; RoHS: Yes; Category: Integrated Circuits (ICs); Pricing 1: 225=2.92067 (USD); Mount: Surface Mount; Case/Package: SSOP; Min Operating Temperature: -40°C; Max Operating Temperature: 125°C; Type: General Purpose; RoHS Compliant: Yes; ComponentLink1URL: http://www.ti.com/lit/ds/symlink/iso7741-q1.pdf?src-supplier=Digi-Key; ComponentLink1Description: http://www.ti.com/lit/ds/symlink/iso7741-q1.pdf?src-supplier=Digi-Key; Supplier Part Number 1: ISO7741QDBQQ1-ND; LCSC Part Number: C553104
footprint 16-SSOP
pins: 1 VCC1, 2 GND1, 3 INA, 4 INB, 5 INC, 6 OUTD, 7 EN1, 8 GND1, 9 GND2, 10 EN2, 11 IND, 12 OUTC, 13 OUTB, 14 OUTA, 15 GND2, 16 VCC2

## J102K1CS33VDC.20
designator K?
RELAY GEN PURPOSE SPDT 3A 3V; Manufacturer: CIT Relay & Switch; Manufacturer Part Number: J102K1CS33VDC.20; Supplier: Digi-Key; Supplier Part Number: 2449-J102K1CS33VDC.20-ND; RoHS: No; Category: Power Relays; Stock: 9880; Pricing: 1=1.6, 10=1.5, 25=1.3332, 50=1.2666, 100=1.1999, 250=1.06656, 500=0.9999, 1000=0.93324, 5000=0.89991 (USD); Item Type: Relay
footprint J102K1CS33VDC.20
pins: 1, 2, 3, 4, 5

## J102K1CS35VDC.20
designator K?
RELAY GEN PURPOSE SPDT 3A 5V; Manufacturer: CIT Relay & Switch; Manufacturer Part Number: J102K1CS35VDC.20; Supplier: Digi-Key; Supplier Part Number: 2449-J102K1CS35VDC.20-ND; RoHS: No; Category: Power Relays; Stock: 15659; Pricing: 1=0.97, 10=0.909, 25=0.808, 50=0.7676, 100=0.7272, 250=0.6464, 500=0.606, 1000=0.5656, 5000=0.5454 (USD)
footprint J102K1CS35VDC.20
pins: 1, 2, 3, 4, 5

## JFC0402-0500FS
designator F?
35A -55℃~+90℃ SMD Fuse 500mA 32V 0402 Fuses ROHS; Manufacturer: Shenzhen JDT Fuse; Manufacturer Part Number: JFC0402-0500FS; Package: 0402; LCSC Part Number: C136320; Item Type: Fuse; ComponentLink1Description: LCSC; ComponentLink1URL: https://www.lcsc.com/product-detail/Fuses_Shenzhen-JDT-Fuse-JFC0402-0500FS_C136320.html
footprint Fuse 0402
pins: 1, 2

## JK-NSMD035-16
designator F?
16V 0.35A 100A 0.75A -40℃~+85℃ 0.25Ω 0.1s 1.3Ω 1206 Resettable Fuses ROHS; Manufacturer: Jinrui Electronic Materials Co.; Manufacturer Part Number: JK-NSMD035-16; Item Type: Fuse; Package: 1206; LCSC Part Number: C2830240; ComponentLink1Description: LCSC; ComponentLink1URL: https://www.lcsc.com/product-detail/Resettable-Fuses_Jinrui-Electronic-Materials-Co-JK-NSMD035-16_C2830240.html
footprint Fuse 1206 (3216 Metric) (0.126" L x 0.062" W x 0.026" H (3.20mm x 1.58mm x 0.65mm))
pins: 1, 2

## JK-SMD200L-24V
designator F?
24V 2A 100A 1.5W -40℃~+85℃ 4A 20mΩ 4.5s 120mΩ 2920 Resettable Fuses ROHS; Manufacturer: Jinrui Electronic Materials; Manufacturer Part Number: JK-SMD200L-24V; Item Type: FUSE; Package: 2920; LCSC Part Number: C692154; ComponentLink1Description: LCSC; ComponentLink1URL: https://www.lcsc.com/product-detail/PTC-Resettable-Fuses_Jinrui-Electronic-Materials-Co-JK-SMD200L-24V_C692154.html
footprint Fuse-2920
pins: 1, 2

## JK-SMD0805-100
designator F?
6V 1A 100A 1.95A 300ms 0805 Resettable Fuses ROHS; Manufacturer: Jinrui Electronic Materials Co.; Manufacturer Part Number: JK-SMD0805-100; Item Type: Fuse; Package: 0805; LCSC Part Number: C369152; ComponentLink1Description: LCSC; ComponentLink1URL: https://www.lcsc.com/product-detail/Resettable-Fuses_Jinrui-Electronic-Materials-Co-JK-SMD0805-100_C369152.html
footprint Fuse-0805
pins: 1, 2

## JK-SMD0805-100-6
designator F?
6V 1A 100A 1.95A - Resettable Fuses ROHS; Manufacturer: Jinrui Electronic Materials Co.; Manufacturer Part Number: JK-SMD0805-100-6; Item Type: Fuse; Package: 0805; LCSC Part Number: C5307781; ComponentLink1Description: LCSC; ComponentLink1URL: https://www.lcsc.com/product-detail/Resettable-Fuses_Jinrui-Electronic-Materials-Co-JK-SMD0805-100-6_C5307781.html
footprint Fuse-0805
pins: 1, 2

## JL301-50009U01
designator J?
1x9P -40℃~+105℃ 15A 300V Blue 12~24 Straight pin 5mm 1 9 Plugin,P=5mm Screw terminal ROHS; Manufacturer: JILN; Manufacturer Part Number: JL301-50009U01; Item Type: Terminal Block; Package: Plugin,P=5mm; LCSC Part Number: C1509684; ComponentLink1Description: LCSC; ComponentLink1URL: https://www.lcsc.com/product-detail/Screw-terminal_JILN-JL301-50009U01_C1509684.html
footprint JL301-50009U01
pins: 1, 2, 3, 4, 5, 6, 7, 8, 9

## JL762B-76202GA1
designator J?
-40℃~+105℃ 20A 300V Green Corner pin Double - Walled(Double) 14~22 Straight pin 2 1 7.62mm Plugin,P=7.62mm Barrier Terminal Blocks ROHS; Manufacturer: JILN; Manufacturer Part Number: JL762B-76202GA1; Package: Plugin,P=7.62mm; LCSC Part Number: C394551; Item Type: Terminal Block; ComponentLink1Description: LCSC; ComponentLink1URL: https://www.lcsc.com/product-detail/Barrier-Terminal-Blocks_JILN-JL762B-76202GA1_C394551.html
footprint JL762B-76202GA1
pins: 1, 2

## JQC-3FF/005-1ZS(551)
designator K?
AgCdO 5V 10A SPDT (1 Form C) Electromagnetic Relay-Single Coil Plugin Power Relays ROHS; Manufacturer: HF(Xiamen Hongfa Electroacoustic); Manufacturer Part Number: JQC-3FF/005-1ZS(551); Item Type: Relay; Package: Plugin; LCSC Part Number: C9221; ComponentLink1Description: LCSC; ComponentLink1URL: https://www.lcsc.com/product-detail/Power-Relays_HF-Xiamen-Hongfa-Electroacoustic-JQC-3FF-005-1ZS-551_C9221.html
footprint JQC-3FF/005-1ZS(551)
pins: 1, 2, 3, 4, 5

## K2-1101DF-C4DW-01
designator Sw?
50mA Lying 100MΩ 100000 Times 250gf@±30gf 12V Plugin Tactile Switches ROHS; Manufacturer: Korean Hroparts Elec; Manufacturer Part Number: K2-1101DF-C4DW-01; Package: Plugin; LCSC Part Number: C502329; Item Type: Tactile Switch; ComponentLink1Description: LCSC; ComponentLink1URL: https://www.lcsc.com/product-detail/Tactile-Switches_Korean-Hroparts-Elec-K2-1101DF-C4DW-01_C502329.html
footprint K2-1101DF-C4DW-01
pins: 1, 2

## K2-1102SP-C4SC-04
designator SW?
-25℃~+85℃ 6mm 5mm Round Button 50mA Brick nogging 6mm SPST 100MΩ 100000 250gf@±30gf 12V SMD Tactile Switches ROHS; Manufacturer: Korean Hroparts Elec; Manufacturer Part Number: K2-1102SP-C4SC-04; Item Type: Switch; Package: SMD; LCSC Part Number: C127509; ComponentLink1Description: LCSC; ComponentLink1URL: https://www.lcsc.com/product-detail/span-style-background-color-ff0-Tactile-span-Switches_Korean-Hroparts-Elec-K2-1102SP-C4SC-04_C127509.html
footprint K2-1102SP-C4SC-04
pins: 1, 2, 3, 4

## K2-6639SP-C4SC-04
designator SW?
50mA Brick nogging SPST 100MΩ 1000000 times 250gf@±30gf 12V SMD Tactile Switches ROHS; Manufacturer: Korean Hroparts Elec; Manufacturer Part Number: K2-6639SP-C4SC-04; LCSC Part Number: C83206; Package: SMD; Item Type: Tactile Switch; ComponentLink1Description: LCSC; ComponentLink1URL: https://www.lcsc.com/product-detail/Tactile-Switches_Korean-Hroparts-Elec-K2-6639SP-C4SC-04_C83206.html
footprint K2-6639SP-C4SC-04
pins: 1, 2, 3, 4

## K4A8G165WC-BCTD
designator U?
IC DDR4 Sdram 512M16 1.2V 96FBGA; Manufacturer: Samsung; Manufacturer Part Number: K4A8G165WC-BCTD; Supplier 1: Arrow Electronics; RoHS: Yes; Supplier Part Number 1: K4A8G165WC-BCTD; LCSC Part Number: C2803251; ComponentLink1Description: LCSC; ComponentLink1URL: https://www.lcsc.com/product-detail/DDR-SDRAM_Samsung-K4A8G165WC-BCTD_C2803251.html; Item Type: IC
footprint FBGA-96_
part A pins: A3 DQU0, A7 DQSU_c, B3 VDD, B7 DQSU_t, B9 VDD, D1 VDD, F3 DQSL_c, F9 ZQ, G2 DQL0, G3 DQSL_t, G7 VDD, J1 VDD, J9 VDD, K2 CKE, K3 ODT, K7 CK_t, K8 CK_c, L1 VDD, L3 ACT_n, L7 CS_n, L8 RAS_n, L9 VDD, M1 VREFCA, N9 TEN, R1 VDD, T3 PAR, T9 VDD
part B pins: B1 VPP, E2 DMU_n/ DBIU_n, E7 DML_n DBIL_n, L2 WE_n/ A14, M2 BG0, M3 A10/AP, M7 A12/BC_n, M8 CAS_n/ A15, N2 BA0, N3 A4, N7 A3, N8 BA1, P1 RESET_n, P2 A6, P3 A0, P7 A1, P8 A5, P9 ALERT_n, R2 A8, R3 A2, R7 A9, R8 A7, R9 VPP, T2 A11, T7 NC, T8 A13
part C pins: B8 DQU1, C2 DQU4, C3 DQU2, C7 DQU3, C8 DQU5, D3 DQU6, D7 DQU7, F7 DQL1, H2 DQL4, H3 DQL2, H7 DQL3, H8 DQL5, J3 DQL6, J7 DQL7
part D pins: A1 VDDQ, A2 VSSQ, A8 VSSQ, A9 VDDQ, C1 VDDQ, C9 VSSQ, D2 VSSQ, D8 VSSQ, D9 VDDQ, E3 VSSQ, E8 VSSQ, F1 VSSQ, F2 VDDQ, F8 VDDQ, G1 VDDQ, G9 VDDQ, H1 VSSQ, H9 VSSQ, J2 VDDQ, J8 VDDQ
part E pins: B2 VSS, E1 VSS, E9 VSS, G8 VSS, K1 VSS, K9 VSS, M9 VSS, N1 VSS, T1 VSS

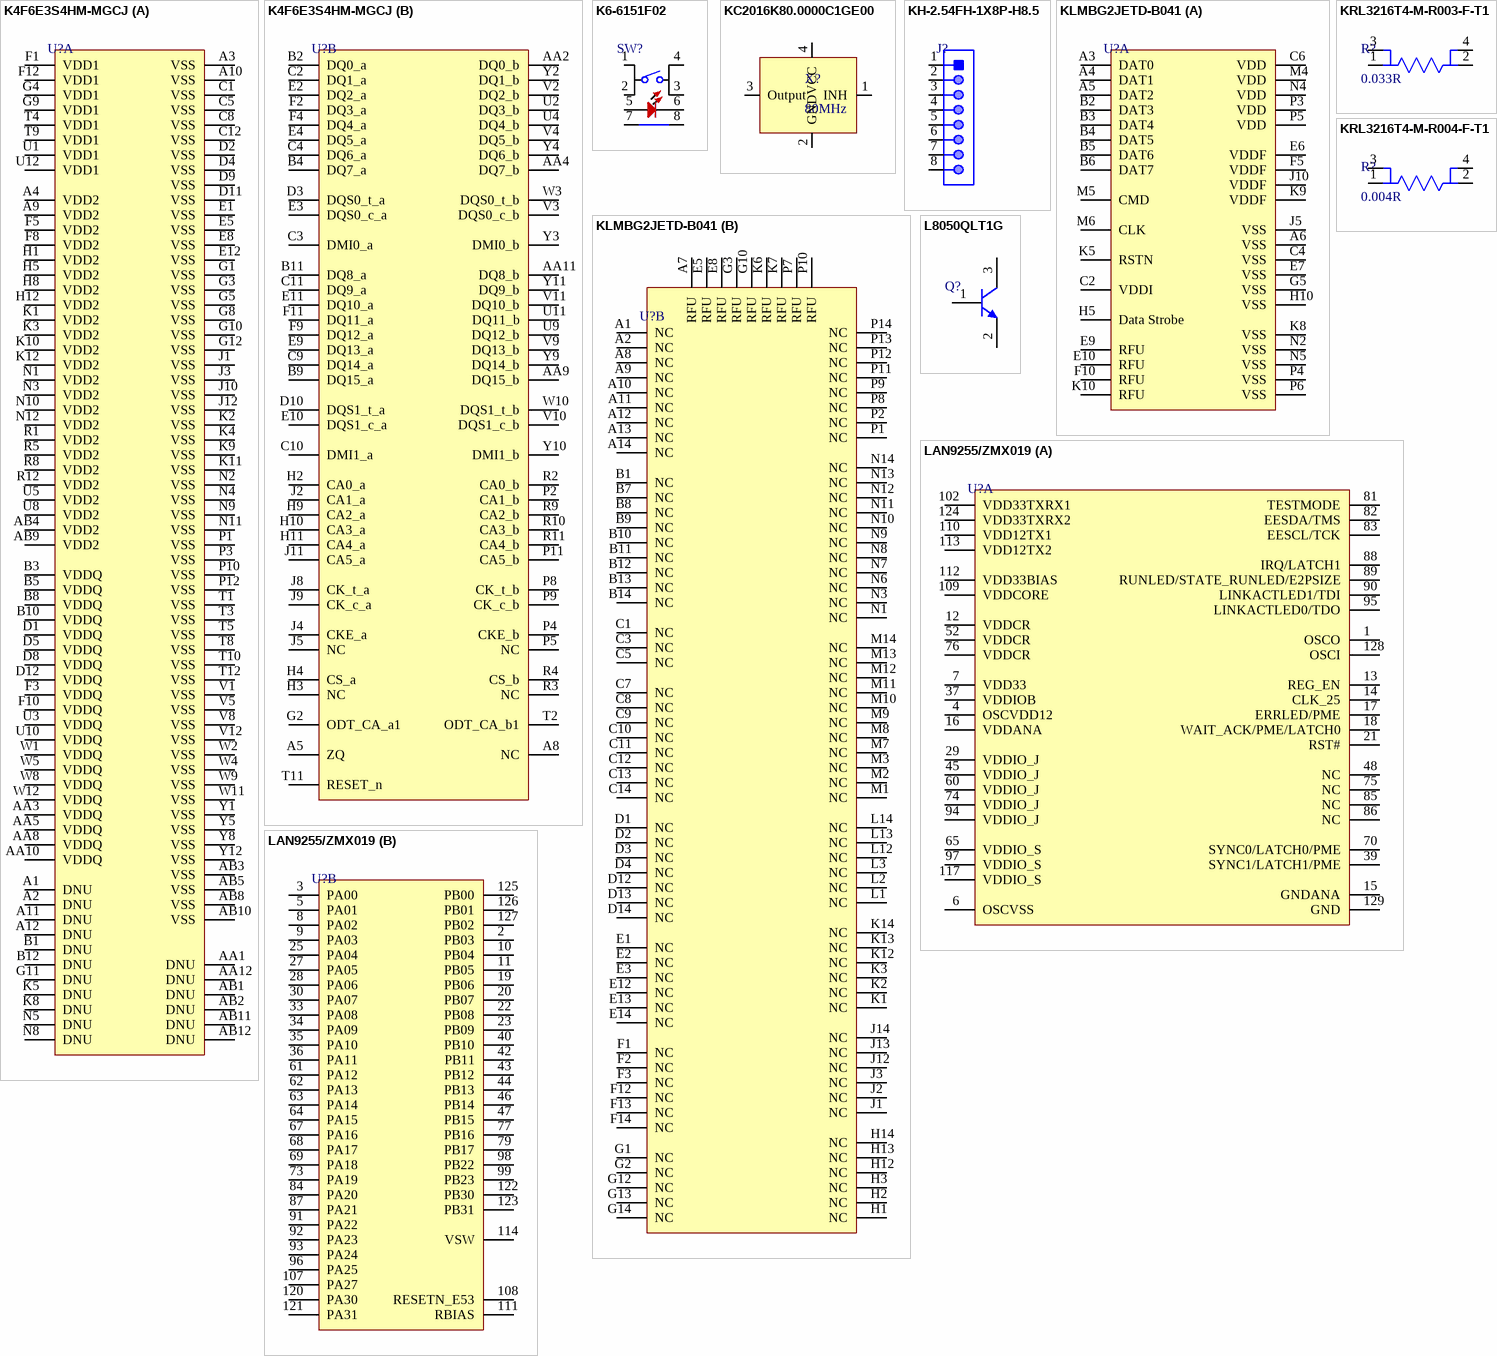
[diagram p12: symbols K4F6E3S4HM-MGCJ to LAN9255/ZMX019]

## K4F6E3S4HM-MGCJ
designator U?
FBGA-200 DDR SDRAM ROHS; Manufacturer: Samsung; Manufacturer Part Number: K4F6E3S4HM-MGCJ; Footprint: FBGA-200; ComponentLink1Description: LCSC; ComponentLink1URL: https://www.lcsc.com/product-detail/DDR-SDRAM_Samsung-K4F6E3S4HM-MGCJ_C2842431.html; LCSC Part Number: C2842431
footprint FBGA-200_
part A pins: A1 DNU, A2 DNU, A3 VSS, A4 VDD2, A9 VDD2, A10 VSS, A11 DNU, A12 DNU, AA1 DNU, AA3 VDDQ, AA5 VDDQ, AA8 VDDQ, AA10 VDDQ, AA12 DNU, AB1 DNU, AB2 DNU, AB3 VSS, AB4 VDD2, AB5 VSS, AB8 VSS, AB9 VDD2, AB10 VSS, AB11 DNU, AB12 DNU, B1 DNU, B3 VDDQ, B5 VDDQ, B8 VDDQ, B10 VDDQ, B12 DNU, C1 VSS, C5 VSS, C8 VSS, C12 VSS, D1 VDDQ, D2 VSS, D4 VSS, D5 VDDQ, D8 VDDQ, D9 VSS, D11 VSS, D12 VDDQ, E1 VSS, E5 VSS, E8 VSS, E12 VSS, F1 VDD1, F3 VDDQ, F5 VDD2, F8 VDD2, F10 VDDQ, F12 VDD1, G1 VSS, G3 VSS, G4 VDD1, G5 VSS, G8 VSS, G9 VDD1, G10 VSS, G11 DNU, G12 VSS, H1 VDD2, H5 VDD2, H8 VDD2, H12 VDD2, J1 VSS, J3 VSS, J10 VSS, J12 VSS, K1 VDD2, K2 VSS, K3 VDD2, K4 VSS, K5 DNU, K8 DNU, K9 VSS, K10 VDD2, K11 VSS, K12 VDD2, N1 VDD2, N2 VSS, N3 VDD2, N4 VSS, N5 DNU, N8 DNU, N9 VSS, N10 VDD2, N11 VSS, N12 VDD2, P1 VSS, P3 VSS, P10 VSS, P12 VSS, R1 VDD2, R5 VDD2, R8 VDD2, R12 VDD2, T1 VSS, T3 VSS, T4 VDD1, T5 VSS, T8 VSS, T9 VDD1, T10 VSS, T12 VSS, U1 VDD1, U3 VDDQ, U5 VDD2, U8 VDD2, U10 VDDQ, U12 VDD1, V1 VSS, V5 VSS, V8 VSS, V12 VSS, W1 VDDQ, W2 VSS, W4 VSS, W5 VDDQ, W8 VDDQ, W9 VSS, W11 VSS, W12 VDDQ, Y1 VSS, Y5 VSS, Y8 VSS, Y12 VSS
part B pins: A5 ZQ, A8 NC, AA2 DQ0_b, AA4 DQ7_b, AA9 DQ15_b, AA11 DQ8_b, B2 DQ0_a, B4 DQ7_a, B9 DQ15_a, B11 DQ8_a, C2 DQ1_a, C3 DMI0_a, C4 DQ6_a, C9 DQ14_a, C10 DMI1_a, C11 DQ9_a, D3 DQS0_t_a, D10 DQS1_t_a, E2 DQ2_a, E3 DQS0_c_a, E4 DQ5_a, E9 DQ13_a, E10 DQS1_c_a, E11 DQ10_a, F2 DQ3_a, F4 DQ4_a, F9 DQ12_a, F11 DQ11_a, G2 ODT_CA_a1, H2 CA0_a, H3 NC, H4 CS_a, H9 CA2_a, H10 CA3_a, H11 CA4_a, J2 CA1_a, J4 CKE_a, J5 NC, J8 CK_t_a, J9 CK_c_a, J11 CA5_a, P2 CA1_b, P4 CKE_b, P5 NC, P8 CK_t_b, P9 CK_c_b, P11 CA5_b, R2 CA0_b, R3 NC, R4 CS_b, R9 CA2_b, R10 CA3_b, R11 CA4_b, T2 ODT_CA_b1, T11 RESET_n, U2 DQ3_b, U4 DQ4_b, U9 DQ12_b, U11 DQ11_b, V2 DQ2_b, V3 DQS0_c_b, V4 DQ5_b, V9 DQ13_b, V10 DQS1_c_b, V11 DQ10_b, W3 DQS0_t_b, W10 DQS1_t_b, Y2 DQ1_b, Y3 DMI0_b, Y4 DQ6_b, Y9 DQ14_b, Y10 DMI1_b, Y11 DQ9_b

## K6-6151F02
designator SW?
Red 50mA Lying 100000 Times 160gf 12V Plugin Tactile Switches ROHS; Manufacturer: Korean Hroparts Elec; Manufacturer Part Number: K6-6151F02; Package: Custom; LCSC Part Number: C693802; Item Type: Tactile Switch; ComponentLink1Description: LCSC; ComponentLink1URL: https://www.lcsc.com/product-detail/Tactile-Switches_Korean-Hroparts-Elec-K6-6151F02_C693802.html
footprint K6-6151F02
pins: 1, 2, 3, 4, 5 L2, 6 L1, 7, 8

## KC2016K80.0000C1GE00
designator X?, comment 80MHz
XTAL OSC XO 80.0000MHZ CMOS SMD; Manufacturer: Kyocera AVX; Manufacturer Part Number: KC2016K80.0000C1GE00; Max Supply Current: 8mA; Frequency Stability: 50ppm; Item Type: Crystal; Supplier 1: Digi-Key; RoHS: Yes; Category: Oscillators; Stock 1: 350; Pricing 1: 1=1.31000, 10=1.25300, 50=1.22440, 100=1.04940, 500=1.02024, 1000=0.85992 (USD); Mount: Surface Mount; Case/Package: SMD/SMT; Min Operating Temperature: -40°C; Max Operating Temperature: 85°C; Packaging: Tape and Reel; Frequency: 80MHz; Length: 0.079inch; Width: 0.063inch; Height: 0.031inch; Lead Free: Lead Free; RoHS Compliant: No; ComponentLink1URL: http://www.mouser.com/ds/2/40/clock_k_e-522534.pdf?src-supplier=Mouser; ComponentLink1Description: http://www.mouser.com/ds/2/40/clock_k_e-522534.pdf?src-supplier=Mouser; ComponentLink2URL: http://www.kyocera-crystal.jp/eng/wp-content/uploads/2014/09/pkg_e.pdf?src-supplier=Digi-Key; ComponentLink2Description: http://www.kyocera-crystal.jp/eng/wp-content/uploads/2014/09/pkg_e.pdf?src-supplier=Digi-Key; ComponentLink3URL: http://global.kyocera.com/prdct/electro/product/pdf/clock_k_e.pdf?src-supplier=Digi-Key; ComponentLink3Description: http://global.kyocera.com/prdct/electro/product/pdf/clock_k_e.pdf?src-supplier=Digi-Key; Supplier Part Number 1: 478-KC2016K80.0000C1GE00CT-ND; LCSC Part Number: C1988243
footprint KC2016K
pins: 1 INH, 2 GND, 3 Output, 4 VCC